# Altium footprint library Biblioteka.PcbLib: 55 footprints (part 3 of 4)
Each footprint in its own frame and in the unit in brackets; x right, y up, seen from the top. Pads: shape width x height; smd on the part's side, far side on the other; paste and mask are expansions set on the pad; w line width, h text height; cw(c..) or ccw(c..) is an arc to the next point about the centre after c.
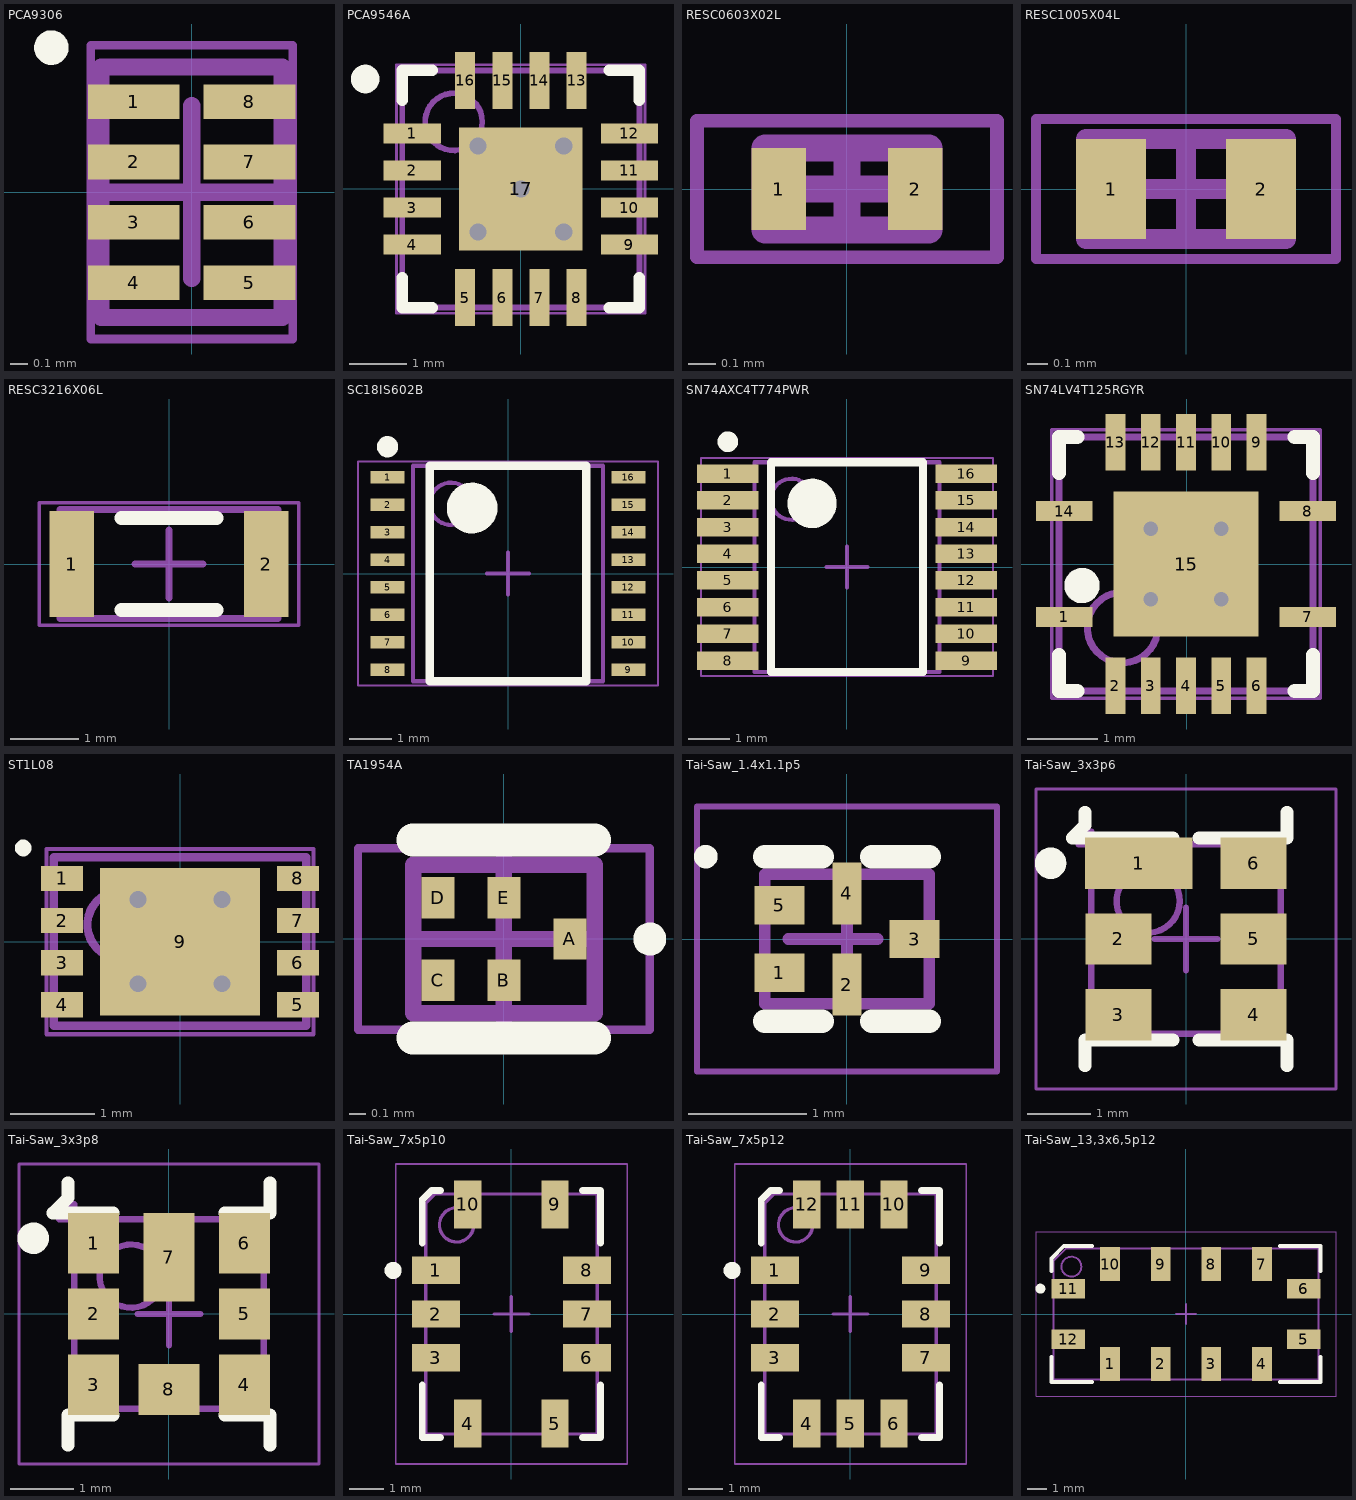
[diagram p2: the footprints below, top view; thin cyan lines are the x and y axes]

## PCA9306 [mm] "8-XFDFN, Body 1,40x1,00mm, Pitch 0,35mm, IPC High Density"
height 0.4
pads (8):
  rect 0.53x0.2 smd: 1(-0.335,0.525) 2(-0.335,0.175) 3(-0.335,-0.175) 4(-0.335,-0.525) 5(0.335,-0.525) 6(0.335,-0.175) 7(0.335,0.175) 8(0.335,0.525)
Top Overlay:
  circle w0.1: c-0.812,0.837 r0.05
Mechanical 13:
  lines w0.1: -0.525,-0.725 0.525,-0.725 0.525,0.725 -0.525,0.725 -0.525,-0.725
Mechanical 15:
  lines w0.05: -0.585,-0.85 0.585,-0.85 0.585,0.85 -0.585,0.85 -0.585,-0.85
  lines w0.1: -0.5,0 0.5,0 ; 0,-0.5 0,0.5
3D body "PCA9306.step": height 0.4, standoff 0, extent -0.526,-0.725 0.526,0.725

## PCA9546A [mm] "RGV (S-PVQFN-N16)"
height 1
pads (21):
  rect 1x0.35 smd: 1(-1.9,0.975) 2(-1.9,0.325) 3(-1.9,-0.325) 4(-1.9,-0.975) 9(1.9,-0.975) 10(1.9,-0.325) 11(1.9,0.325) 12(1.9,0.975)
  rect 0.35x1 smd: 5(-0.975,-1.9) 6(-0.325,-1.9) 7(0.325,-1.9) 8(0.975,-1.9) 13(0.975,1.9) 14(0.325,1.9) 15(-0.325,1.9) 16(-0.975,1.9)
  rect 2.16x2.16 smd paste-2: 17(0,0)
  rect 0.9x0.9 on Top Paste: ""(-0.6,-0.6) ""(-0.6,0.6) ""(0.6,-0.6) ""(0.6,0.6)
via 0,0 diameter 0.5 hole 0.3
via 0.75,-0.75 diameter 0.5 hole 0.3
via -0.75,-0.75 diameter 0.5 hole 0.3
via 0.75,0.75 diameter 0.5 hole 0.3
via -0.75,0.75 diameter 0.5 hole 0.3
Top Overlay:
  circle w0.25: c-2.725,1.925 r0.125
  lines w0.2: -2.075,-1.55 -2.075,-2.075 -1.55,-2.075 ; -2.075,1.55 -2.075,2.075 -1.55,2.075 ; 1.55,-2.075 2.075,-2.075 2.075,-1.55 ; 1.55,2.075 2.075,2.075 2.075,1.55
Mechanical 13:
  circle w0.1: c-1.175,1.175 r0.5
  lines w0.1: -2.075,-2.075 2.075,-2.075 2.075,2.075 -2.075,2.075 -2.075,-2.075
Mechanical 15:
  lines w0.05: -2.175,-2.175 2.175,-2.175 2.175,2.175 -2.175,2.175 -2.175,-2.175
  lines w0.1: -0.5,0 0.5,0 ; 0,-0.5 0,0.5
3D body "PCA9546A.step": height 1, standoff 0, extent -2.075,-2.075 2.075,2.075

## RESC0603X02L [mm] "Chip Resistor, 2-Leads, Body 0,60x0,30mm, IPC High Density"
height 0.23
pads (2):
  rect 0.2x0.3 smd: 1(-0.25,0) 2(0.25,0)
Mechanical 13:
  lines w0.1: -0.3,-0.15 0.3,-0.15 0.3,0.15 -0.3,0.15 -0.3,-0.15
Mechanical 15:
  lines w0.05: -0.55,-0.25 0.55,-0.25 0.55,0.25 -0.55,0.25 -0.55,-0.25
  lines w0.1: -0.15,0 0.15,0 ; 0,-0.15 0,0.15
3D body "RESC0603X02L.step": height 0.23, standoff 0, extent -0.3,-0.15 0.3,0.15

## RESC1005X04L [mm] "Chip Resistor, 2-Leads, Body 1,00x0,50mm, IPC High Density"
height 0.35
pads (2):
  rect 0.35x0.5 smd: 1(-0.375,0) 2(0.375,0)
Mechanical 13:
  lines w0.1: -0.5,-0.25 0.5,-0.25 0.5,0.25 -0.5,0.25 -0.5,-0.25
Mechanical 15:
  lines w0.05: -0.75,-0.35 0.75,-0.35 0.75,0.35 -0.75,0.35 -0.75,-0.35
  lines w0.1: -0.25,0 0.25,0 ; 0,-0.25 0,0.25
3D body "RESC1005X04L.step": height 0.35, standoff 0, extent -0.5,-0.25 0.5,0.25

## RESC3216X06L [mm] "Chip Resistor, 2-Leads, Body 3,20x1,60mm, IPC High Density"
height 0.6
pads (2):
  rect 0.65x1.55 smd: 1(-1.425,0) 2(1.425,0)
Top Overlay:
  lines w0.2: -0.7,-0.675 0.7,-0.675 ; -0.7,0.675 0.7,0.675
Mechanical 13:
  lines w0.1: -1.6,-0.8 -1.6,0.8 1.6,0.8 1.6,-0.8 -1.6,-0.8
Mechanical 15:
  lines w0.05: -1.9,-0.9 -1.9,0.9 1.9,0.9 1.9,-0.9 -1.9,-0.9
  lines w0.1: -0.5,0 0.5,0 ; 0,-0.5 0,0.5
3D body "RESC3216X06L.step": height 0.6, standoff 0, extent -1.6,-0.8 1.6,0.8

## SC18IS602B [mm] "TSSOP16: plastic thin shrink small outline package; 16 leads; body width 4.4 mm"
height 1.1
pads (16):
  rect 0.8x0.3 smd: 1(-2.85,2.275) 2(-2.85,1.625) 3(-2.85,0.975) 4(-2.85,0.325) 5(-2.85,-0.325) 6(-2.85,-0.975) 7(-2.85,-1.625) 8(-2.85,-2.275) 9(2.85,-2.275) 10(2.85,-1.625) 11(2.85,-0.975) 12(2.85,-0.325) 13(2.85,0.325) 14(2.85,0.975) 15(2.85,1.625) 16(2.85,2.275)
Top Overlay:
  circle w0.25: c-2.85,3 r0.125
  circle w0.6: c-0.85,1.55 r0.3
  lines w0.2: -1.85,-2.55 -1.85,2.55 1.85,2.55 1.85,-2.55 -1.85,-2.55
Mechanical 13:
  circle w0.1: c-1.35,1.65 r0.5
  lines w0.1: -2.25,-2.55 -2.25,2.55 2.25,2.55 2.25,-2.55 -2.25,-2.55
Mechanical 15:
  lines w0.05: -3.55,-2.65 -3.55,2.65 3.55,2.65 3.55,-2.65 -3.55,-2.65
  lines w0.1: -0.5,0 0.5,0 ; 0,-0.5 0,0.5
3D body "SC18IS602B.step": height 1.1, standoff 0, extent -3.2,-2.55 3.2,2.55

## SN74AXC4T774PWR [mm] "TSOP,PW0016A, 16-Leads, Body 5,00x4,40mm, Pitch 0,65mm, IPC High Density"
height 1.2
pads (16):
  rect 1.5x0.45 smd: 1(-2.9,2.275) 2(-2.9,1.625) 3(-2.9,0.975) 4(-2.9,0.325) 5(-2.9,-0.325) 6(-2.9,-0.975) 7(-2.9,-1.625) 8(-2.9,-2.275) 9(2.9,-2.275) 10(2.9,-1.625) 11(2.9,-0.975) 12(2.9,-0.325) 13(2.9,0.325) 14(2.9,0.975) 15(2.9,1.625) 16(2.9,2.275)
Top Overlay:
  circle w0.6: c-0.85,1.55 r0.3
  circle w0.25: c-2.9,3.05 r0.125
  lines w0.2: -1.85,-2.55 1.85,-2.55 1.85,2.55 -1.85,2.55 -1.85,-2.55
Mechanical 13:
  circle w0.1: c-1.35,1.65 r0.5
  lines w0.1: -2.25,-2.55 2.25,-2.55 2.25,2.55 -2.25,2.55 -2.25,-2.55
Mechanical 15:
  lines w0.05: -3.55,-2.65 3.55,-2.65 3.55,2.65 -3.55,2.65 -3.55,-2.65
  lines w0.1: -0.5,0 0.5,0 ; 0,-0.5 0,0.5
3D body "SN74AXC4T774PWR.step": height 1.2, standoff 0, extent -3.2,-2.55 3.2,2.55

## SN74LV4T125RGYR [mm] "14-VFQFN Exposed Pad"
height 1
pads (15):
  rect 0.8x0.28 smd: 1(-1.733,-0.75) 7(1.717,-0.75) 8(1.717,0.75) 14(-1.733,0.75)
  rect 0.28x0.8 smd: 2(-1.008,-1.725) 3(-0.508,-1.725) 4(-0.008,-1.725) 5(0.492,-1.725) 6(0.992,-1.725) 9(0.992,1.725) 10(0.492,1.725) 11(-0.008,1.725) 12(-0.508,1.725) 13(-1.008,1.725)
  rect 2.05x2.05 smd paste-3: 15(-0.008,0)
via 0.492,0.5 diameter 0.5 hole 0.2
via -0.508,0.5 diameter 0.5 hole 0.2
via 0.492,-0.5 diameter 0.5 hole 0.2
via -0.508,-0.5 diameter 0.5 hole 0.2
Top Overlay:
  circle w0.25: c-1.481,-0.305 r0.125
  lines w0.2: -1.808,-1.29 -1.808,-1.8 -1.548,-1.8 ; -1.808,1.29 -1.808,1.8 -1.548,1.8 ; 1.532,-1.8 1.792,-1.8 1.792,-1.29 ; 1.532,1.8 1.792,1.8 1.792,1.29
Top Paste:
  region: 0.962,-0.97 0.962,-0.15 0.142,-0.15 0.142,-0.97
  region: 0.962,0.15 0.962,0.97 0.142,0.97 0.142,0.15
  region: -0.158,-0.97 -0.158,-0.15 -0.978,-0.15 -0.978,-0.97
  region: -0.158,0.15 -0.158,0.97 -0.978,0.97 -0.978,0.15
Mechanical 13:
  circle w0.1: c-0.908,-0.9 r0.5
  lines w0.1: -1.808,-1.8 1.792,-1.8 1.792,1.8 -1.808,1.8 -1.808,-1.8
Mechanical 15:
  lines w0.05: -1.908,-1.9 1.892,-1.9 1.892,1.9 -1.908,1.9 -1.908,-1.9
  lines w0.1: -0.508,0 0.492,0 ; -0.008,-0.5 -0.008,0.5
3D body "TPS54620RGYR.step": height 1, standoff 0, extent -1.808,-1.8 1.792,1.8

## ST1L08 [mm] "DFN8 (2x3 mm) package outline"
height 0.9
pads (9):
  rect 0.5x0.3 smd: 1(-1.4,0.75) 2(-1.4,0.25) 3(-1.4,-0.25) 4(-1.4,-0.75) 5(1.4,-0.75) 6(1.4,-0.25) 7(1.4,0.25) 8(1.4,0.75)
  rect 1.9x1.75 smd: 9(0,0)
via -0.5,0.5 diameter 0.5 hole 0.2
via 0.5,0.5 diameter 0.5 hole 0.2
via -0.5,-0.5 diameter 0.5 hole 0.2
via 0.5,-0.5 diameter 0.5 hole 0.2
Top Overlay:
  circle w0.1: c-1.862,1.112 r0.05
Mechanical 13:
  circle w0.1: c-0.7,0.2 r0.4
  lines w0.1: -1.5,-1 -1.5,1 1.5,1 1.5,-1 -1.5,-1
Mechanical 15:
  lines w0.05: -1.585,-1.1 -1.585,1.1 1.585,1.1 1.585,-1.1 -1.585,-1.1
  lines w0.1: -0.5,0 0.5,0 ; 0,-0.5 0,0.5
3D body "ST1L08.step": height 0.9, standoff 0, extent -1.501,-1 1.501,1

## TA1954A [mm] "5-Leads, Body 0,90x1,10mm"
height 0.95
pads (5):
  rect 0.2x0.25 smd: A(0.4,0) B(0,-0.25) C(-0.4,-0.25) D(-0.4,0.25) E(0,0.25)
Top Overlay:
  circle w0.1: c0.885,0 r0.05
  lines w0.2: -0.55,-0.6 0.55,-0.6 ; -0.55,0.6 0.55,0.6
Mechanical 13:
  lines w0.1: -0.55,-0.45 -0.55,0.45 0.55,0.45 0.55,-0.45 -0.55,-0.45
Mechanical 15:
  lines w0.05: -0.885,-0.55 -0.885,0.55 0.885,0.55 0.885,-0.55 -0.885,-0.55
  lines w0.1: -0.5,0 0.5,0 ; 0,-0.5 0,0.5
3D body "TA1954A.step": height 0.95, standoff 0.05, extent -0.55,-0.45 0.55,0.45

## Tai-Saw_1.4x1.1p5 [mm] "TA2298A, 6-Leads, Body 1,40x1,10mm, Pitch 0,57mm/0,50mm, IPC Medium Density"
height 0.7
pads (5):
  rect 0.425x0.325 smd: 1(-0.575,-0.288) 3(0.575,0) 5(-0.575,0.288)
  rect 0.25x0.525 smd: 2(0,-0.387) 4(0,0.387)
Top Overlay:
  circle w0.1: c-1.2,0.7 r0.05
  lines w0.2: -0.7,-0.7 -0.212,-0.7 ; -0.7,0.7 -0.212,0.7 ; 0.213,-0.7 0.7,-0.7 ; 0.213,0.7 0.7,0.7
Mechanical 13:
  lines w0.1: -0.7,-0.55 -0.7,0.55 0.7,0.55 0.7,-0.55 -0.7,-0.55
Mechanical 15:
  lines w0.05: -1.275,-1.125 -1.275,1.125 1.275,1.125 1.275,-1.125 -1.275,-1.125
  lines w0.1: -0.5,0 0.26,0 ; 0,-0.5 0,0.5
3D body "Tai-Saw_1.4x1.1p5.step": height 0.7, standoff 0, extent -0.7,-0.56 0.7,0.56

## Tai-Saw_3x3p6 [mm] "TA1251B, 6-Pins, Body 3,00x3,00mmx1,40mm, Pitch 1,20mm, IPC Medium Density"
height 1.4
pads (6):
  rect 1.7x0.81 smd: 1(-0.75,1.2)
  rect 1.05x0.81 smd: 2(-1.07,0) 3(-1.07,-1.2) 4(1.07,-1.2) 5(1.07,0) 6(1.07,1.2)
Top Overlay:
  circle w0.25: c-2.145,1.2 r0.125
  lines w0.2: -1.6,-2.005 -1.6,-1.6 -0.205,-1.6 ; -1.6,2.005 -1.6,1.802 -1.803,1.6 -0.205,1.6 ; 0.205,-1.6 1.6,-1.6 1.6,-2.005 ; 0.205,1.6 1.6,1.6 1.6,2.005
Mechanical 13:
  circle w0.1: c-0.6,0.6 r0.5
  lines w0.1: -1.703,1.5 -1.5,1.702 -1.5,-1.5 1.5,-1.5 1.5,1.5 -1.703,1.5
Mechanical 15:
  lines w0.05: -2.375,-2.375 2.375,-2.375 2.375,2.375 -2.375,2.375 -2.375,-2.375
  lines w0.1: -0.5,0 0.5,0 ; 0,-0.5 0,0.5
3D body "Tai-Saw_3x3p6.step": height 1.4, standoff 0, extent -1.5,-1.5 1.5,1.5

## Tai-Saw_3x3p8 [mm] "TA0726A, 8-Pins, Body 3,00x3,00mmx1,40mm, Pitch 1,20mm, IPC Medium Density"
height 1.4
pads (8):
  rect 0.81x0.96 smd: 1(-1.195,1.12) 3(-1.195,-1.12) 4(1.195,-1.12) 6(1.195,1.12)
  rect 0.81x0.81 smd: 2(-1.195,0) 5(1.195,0)
  rect 0.81x1.4 smd: 7(0,0.9)
  rect 0.96x0.81 smd: 8(0,-1.195)
Top Overlay:
  circle w0.25: c-2.15,1.2 r0.125
  lines w0.2: -1.6,-2.08 -1.6,-1.6 -0.88,-1.6 ; -1.6,2.08 -1.6,1.84 -1.84,1.6 -0.88,1.6 ; 0.88,-1.6 1.6,-1.6 1.6,-2.08 ; 0.88,1.6 1.6,1.6 1.6,2.08
Mechanical 13:
  circle w0.1: c-0.6,0.6 r0.5
  lines w0.1: -1.74,1.5 1.5,1.5 1.5,-1.5 -1.5,-1.5 -1.5,1.74 -1.74,1.5
Mechanical 15:
  lines w0.05: -2.375,-2.375 -2.375,2.375 2.375,2.375 2.375,-2.375 -2.375,-2.375
  lines w0.1: -0.5,0 0.5,0 ; 0,-0.5 0,0.5
3D body "Tai-Saw_3x3.step": height 1.4, standoff 0, extent -1.5,-1.605 1.5,1.5

## Tai-Saw_7x5p10 [mm] "TA0409A, 10-Pins, Body 5,00x7,00mmx1,70mm, Pitch 1,27mm, IPC Medium Density"
height 1.7
pads (10):
  rect 1.4x0.8 smd: 1(-2.2,1.27) 2(-2.2,0) 3(-2.2,-1.27) 6(2.2,-1.27) 7(2.2,0) 8(2.2,1.27)
  rect 0.8x1.4 smd: 4(-1.27,-3.2) 5(1.27,-3.2) 9(1.27,3.2) 10(-1.27,3.2)
Top Overlay:
  circle w0.25: c-3.45,1.27 r0.125
  lines w0.2: -2.6,-2.07 -2.6,-3.6 -2.07,-3.6 ; -2.6,2.07 -2.6,3.335 -2.335,3.6 -2.07,3.6 ; 2.07,-3.6 2.6,-3.6 2.6,-2.07 ; 2.07,3.6 2.6,3.6 2.6,2.07
Mechanical 13:
  circle w0.1: c-1.6,2.6 r0.5
  lines w0.1: -2.5,-3.5 2.5,-3.5 2.5,3.5 -2.235,3.5 -2.5,3.235 -2.5,-3.5
Mechanical 15:
  lines w0.05: -3.375,-4.375 3.375,-4.375 3.375,4.375 -3.375,4.375 -3.375,-4.375
  lines w0.1: -0.5,0 0.5,0 ; 0,-0.5 0,0.5
3D body "Tai-Saw_7x5.step": height 1.7, standoff 0, extent -2.5,-3.5 2.5,3.5

## Tai-Saw_7x5p12 [mm] "TA0409A, 12-Pins, Body 5,00x7,00mmx1,70mm, Pitch 1,27mm, IPC Medium Density"
height 1.7
pads (12):
  rect 1.4x0.8 smd: 1(-2.2,1.27) 2(-2.2,0) 3(-2.2,-1.27) 7(2.2,-1.27) 8(2.2,0) 9(2.2,1.27)
  rect 0.8x1.4 smd: 4(-1.27,-3.2) 5(0,-3.2) 6(1.27,-3.2) 10(1.27,3.2) 11(0,3.2) 12(-1.27,3.2)
Top Overlay:
  circle w0.25: c-3.45,1.27 r0.125
  lines w0.2: -2.6,-2.07 -2.6,-3.6 -2.07,-3.6 ; -2.6,2.07 -2.6,3.335 -2.335,3.6 -2.07,3.6 ; 2.07,-3.6 2.6,-3.6 2.6,-2.07 ; 2.07,3.6 2.6,3.6 2.6,2.07
Mechanical 13:
  circle w0.1: c-1.6,2.6 r0.5
  lines w0.1: -2.5,-3.5 -2.5,3.235 -2.235,3.5 2.5,3.5 2.5,-3.5 -2.5,-3.5
Mechanical 15:
  lines w0.05: -3.375,-4.375 -3.375,4.375 3.375,4.375 3.375,-4.375 -3.375,-4.375
  lines w0.1: -0.5,0 0.5,0 ; 0,-0.5 0,0.5
3D body "Tai-Saw_7x5.step": height 1.7, standoff 0, extent -2.5,-3.5 2.5,3.5

## Tai-Saw_13,3x6,5p12 [mm] "TB0467A, 12-Pins, Body 13,30x6,5mmx1,40mm, Pitch 2,54mm, IPC Medium Density"
height 1.4
pads (12):
  rect 0.99x1.7 smd: 1(-3.81,-2.5) 2(-1.27,-2.5) 3(1.27,-2.5) 4(3.81,-2.5) 7(3.81,2.5) 8(1.27,2.5) 9(-1.27,2.5) 10(-3.81,2.5)
  rect 1.7x0.99 smd: 5(5.905,-1.27) 6(5.905,1.27) 11(-5.905,1.27) 12(-5.905,-1.27)
Top Overlay:
  circle w0.25: c-7.305,1.27 r0.125
  lines w0.2: -6.75,-2.165 -6.75,-3.4 -4.705,-3.4 ; -6.75,2.165 -6.75,2.782 -6.132,3.4 -4.705,3.4 ; 4.705,-3.4 6.75,-3.4 6.75,-2.165 ; 4.705,3.4 6.75,3.4 6.75,2.165
Mechanical 13:
  circle w0.1: c-5.75,2.375 r0.5
  lines w0.1: -6.65,-3.275 6.65,-3.275 6.65,3.275 -6.032,3.275 -6.65,2.658 -6.65,-3.275
Mechanical 15:
  lines w0.05: -7.525,-4.125 7.525,-4.125 7.525,4.125 -7.525,4.125 -7.525,-4.125
  lines w0.1: -0.5,0 0.5,0 ; 0,-0.5 0,0.5